# Altium footprint library Miscellaneous Devices.PcbLib: 306 footprints (part 6 of 20)
Each footprint in its own frame and in the unit in brackets; x right, y up, seen from the top. Pads: shape width x height; smd on the part's side, far side on the other; paste and mask are expansions set on the pad; w line width, h text height; cw(c..) or ccw(c..) is an arc to the next point about the centre after c.
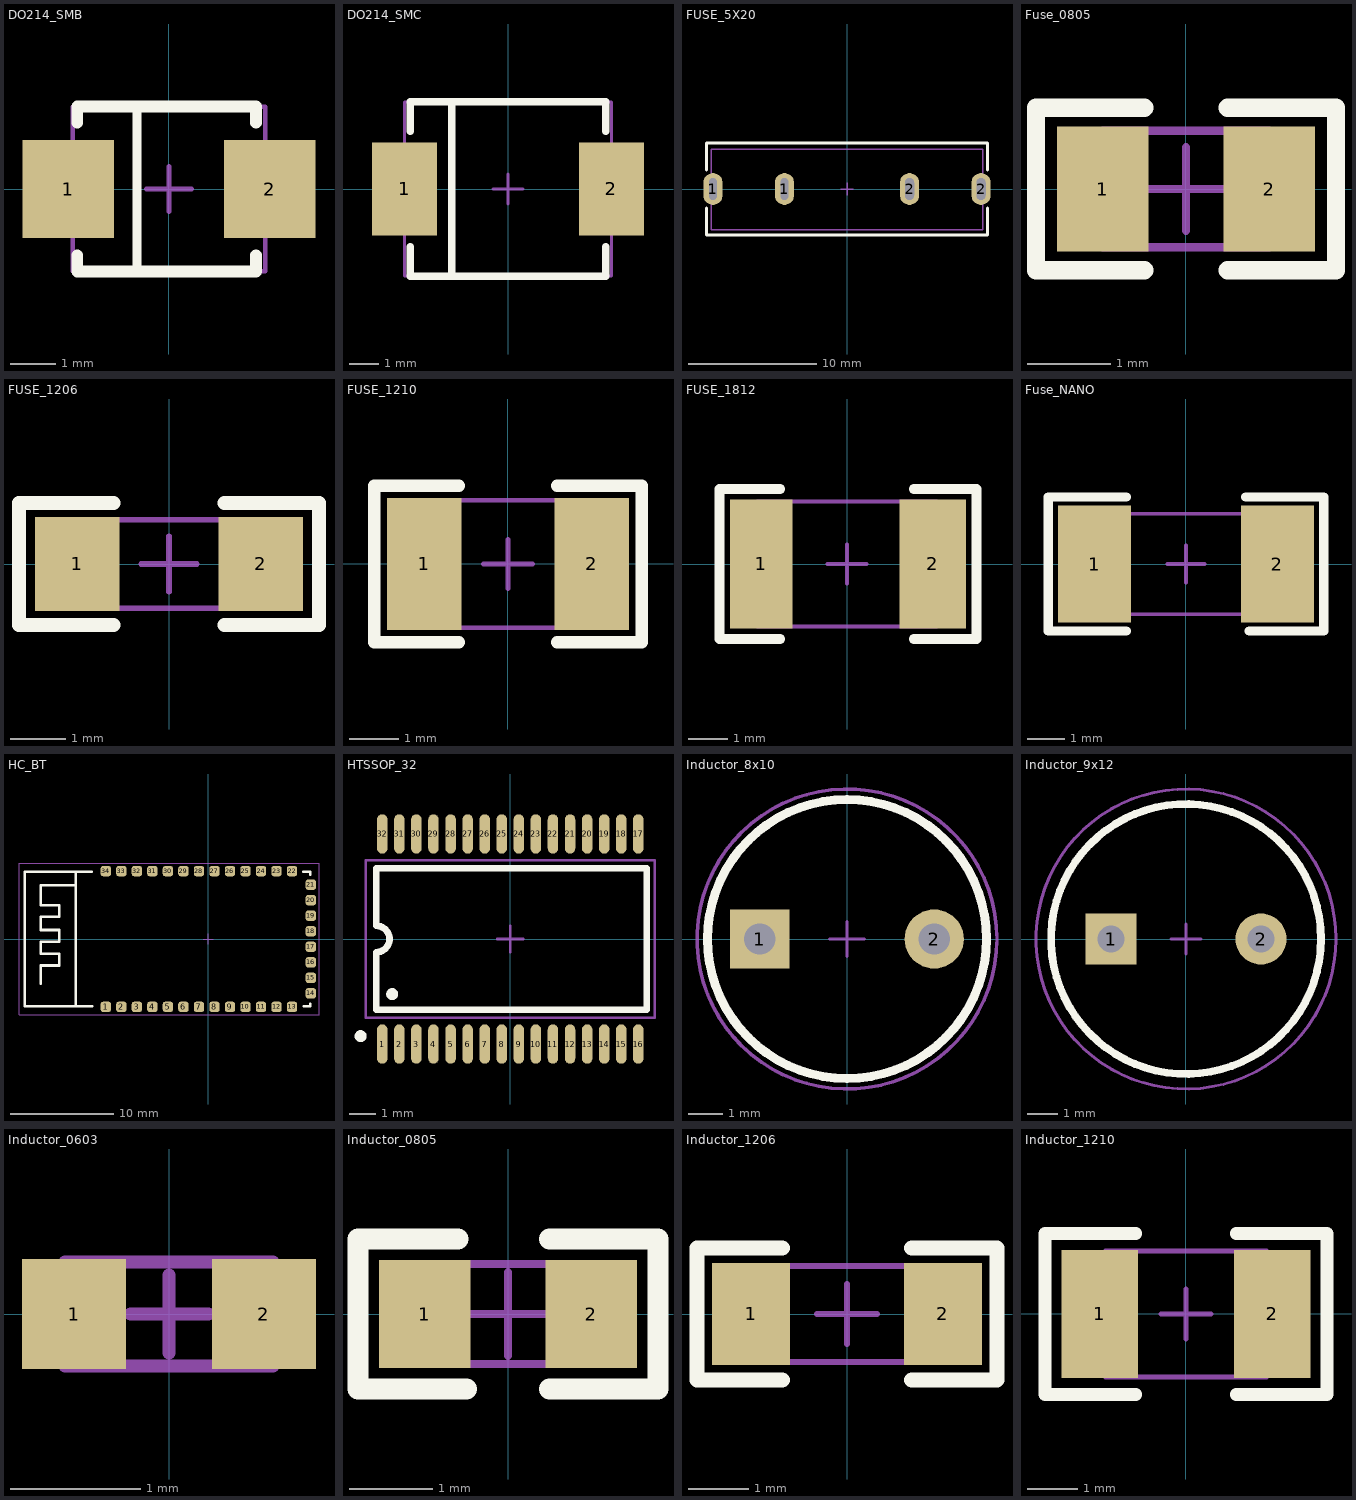
[diagram p5: the footprints below, top view; thin cyan lines are the x and y axes]

## DO214_SMB [mm]
pads (2):
  rect 2x2.15 smd: 1(-2.2,0) 2(2.2,0)
Top Overlay:
  lines w0.2: -0.7,-1.8 -0.7,1.8
  lines w0.254: -2,-1.45 -2,-1.8 1.9,-1.8 1.9,-1.45 ; -2,1.45 -2,1.8 1.9,1.8 1.9,1.45
Mechanical 15:
  lines w0.1: -0.5,0 0.5,0 ; 0,-0.5 0,0.5 ; -2.1,-1.8 -2.1,1.8 2.1,1.8 2.1,-1.8 -2.1,-1.8
3D body: height 2.3, standoff 0, extent -2.7,-1.8 2.7,1.8

## DO214_SMC [mm]
pads (2):
  rect 2.2x3.15 smd: 1(-3.5,0) 2(3.5,0)
Top Overlay:
  lines w0.254: -3.3,-1.95 -3.3,-2.95 3.3,-2.95 3.3,-1.95 ; -3.3,1.95 -3.3,2.95 3.3,2.95 3.3,1.95 ; -1.9,-2.95 -1.9,2.95
Mechanical 15:
  lines w0.1: -0.5,0 0.5,0 ; 0,-0.5 0,0.5 ; -3.5,-2.95 -3.5,2.95 3.5,2.95 3.5,-2.95 -3.5,-2.95
3D body: height 2.3, standoff 0, extent -4,-2.95 3.95,2.95

## FUSE_5X20 [mm]
pads (4):
  oval 1.5x2.5 hole 0.6 slot 1.7 at 90 deg: 1(-10.5,0) 1(-4.9,0)
  oval 1.5x2.5 hole 0.7 slot 1.7 at 90 deg: 2(4.9,0) 2(10.5,0)
Top Overlay:
  lines w0.254: -11,-1.5 -11,-3.6 11,-3.6 11,-1.5 ; -11,1.5 -11,3.6 11,3.6 11,1.5
Mechanical 15:
  lines w0.1: -0.5,0 0.5,0 ; 0,-0.5 0,0.5 ; -10.652,-3.2 -10.652,3.1 10.626,3.1 10.626,-3.2 -10.652,-3.2
3D body: height 9.59, standoff -3.31, extent -10.652,-3.135 10.626,3.055

## Fuse_0805 [mm]
pads (2):
  rect 1.1x1.5 smd: 1(-1,0) 2(1,0)
Top Overlay:
  lines w0.22: -0.5,-0.975 -1.8,-0.975 -1.8,0.975 -0.5,0.975 ; 0.5,-0.975 1.8,-0.975 1.8,0.975 0.5,0.975
Mechanical 15:
  lines w0.1: -0.5,0 0.5,0 ; 0,-0.5 0,0.5 ; -1,-0.7 1,-0.7 1,0.7 -1,0.7 -1,-0.7
3D body: height 1.24, standoff 0, extent -1.105,-0.75 1.105,0.749

## FUSE_1206 [mm]
pads (2):
  rect 1.524x1.7 smd: 1(-1.65,0) 2(1.65,0)
Top Overlay:
  lines w0.254: -1,-1.1 -2.7,-1.1 -2.7,1.1 -1,1.1 ; 1,-1.1 2.7,-1.1 2.7,1.1 1,1.1
Mechanical 15:
  lines w0.1: -0.5,0 0.5,0 ; 0,-0.5 0,0.5 ; -1.6,-0.8 1.6,-0.8 1.6,0.8 -1.6,0.8 -1.6,-0.8
3D body: height 1.43, standoff -0.03, extent -1.601,-0.852 1.601,0.8

## FUSE_1210 [mm]
pads (2):
  rect 1.52x2.7 smd: 1(-1.71,0) 2(1.71,0)
Top Overlay:
  lines w0.254: -1,-1.6 -2.725,-1.6 -2.725,1.6 -1,1.6 ; 1,-1.6 2.725,-1.6 2.725,1.6 1,1.6
Mechanical 15:
  lines w0.1: -0.5,0 0.5,0 ; 0,-0.5 0,0.5 ; -1.6,-1.3 1.6,-1.3 1.6,1.3 -1.6,1.3 -1.6,-1.3
3D body: height 0.67, standoff 0, extent -1.607,-1.275 1.608,1.3

## FUSE_1812 [mm]
pads (2):
  rect 1.6x3.3 smd: 1(-2.2,0)
  rect 1.7x3.3 smd: 2(2.2,0)
Top Overlay:
  lines w0.254: -1.714,-1.925 -3.275,-1.925 -3.275,1.925 -1.714,1.925 ; 1.714,-1.925 3.325,-1.925 3.325,1.925 1.714,1.925
Mechanical 15:
  lines w0.1: -0.5,0 0.5,0 ; 0,-0.5 0,0.5 ; -2.3,-1.6 2.3,-1.6 2.3,1.6 -2.3,1.6 -2.3,-1.6
3D body: height 1.03, standoff 0, extent -2.321,-1.748 2.414,1.732

## Fuse_NANO [mm]
pads (2):
  rect 1.96x3.15 smd: 1(-2.455,0) 2(2.455,0)
Top Overlay:
  lines w0.254: -1.6,-1.8 -3.7,-1.8 -3.7,1.8 -1.6,1.8 ; 1.6,1.8 3.7,1.8 3.7,-1.8 1.7,-1.8
Mechanical 15:
  lines w0.1: -0.5,0 0.5,0 ; 0,-0.5 0,0.5 ; -3.05,-1.35 -3.05,1.35 3.05,1.35 3.05,-1.35 -3.05,-1.35
3D body: height 2.7, standoff 0, extent -3.05,-1.35 3.05,1.35

## HC_BT [mm]
pads (34):
  rrect50% 1x1 smd: 1(-9.906,-6.562) 2(-8.406,-6.562) 3(-6.906,-6.562) 4(-5.406,-6.562) 5(-3.906,-6.562) 6(-2.406,-6.562) 7(-0.906,-6.562) 8(0.594,-6.562) 9(2.094,-6.562) 10(3.594,-6.562) 11(5.094,-6.562) 12(6.594,-6.562) 13(8.094,-6.562) 14(9.906,-5.25) 15(9.906,-3.75) 16(9.906,-2.25) 17(9.906,-0.75) 18(9.906,0.75) 19(9.906,2.25) 20(9.906,3.75) 21(9.906,5.25) 22(8.094,6.562) 23(6.594,6.562) 24(5.094,6.562) 25(3.594,6.562) 26(2.094,6.562) 27(0.594,6.562) 28(-0.906,6.562) 29(-2.406,6.562) 30(-3.906,6.562) 31(-5.406,6.562) 32(-6.906,6.562) 33(-8.406,6.562) 34(-9.906,6.562)
Top Overlay:
  lines w0.254: -16.191,-4.341 -16.191,-2.563 -14.413,-2.563 -14.413,-1.42 -16.191,-1.42 -16.191,-0.277 -14.413,-0.277 -14.413,0.866 -16.191,0.866 -16.191,2.136 -14.413,2.136 -14.413,3.279 -16.191,3.279 -16.191,5.184 -16.181,5.194 -12.899,5.194 ; -12.8,-6.5 -12.8,6.5 ; -11.284,6.5 -17.756,6.5 -17.756,-6.5 -11.238,-6.5 ; 9.163,6.5 9.844,6.5 9.844,6.2 ; 9.209,-6.5 9.844,-6.5 9.844,-6.246
Mechanical 15:
  lines w0.1: -0.5,0 0.5,0 ; 0,-0.5 0,0.5 ; -18.3,-7.3 10.7,-7.3 10.7,7.3 -18.3,7.3 -18.3,-7.3
3D body: height 2.35, standoff 0, extent -18.11,-7 9.9,7.02

## HTSSOP_32 [mm] "6   0.65"
pads (32):
  oval 0.4x1.5 smd: 1(-4.875,-4) 2(-4.225,-4) 3(-3.575,-4) 4(-2.925,-4) 5(-2.275,-4) 6(-1.625,-4) 7(-0.975,-4) 8(-0.325,-4) 9(0.325,-4) 10(0.975,-4) 11(1.625,-4) 12(2.275,-4) 13(2.925,-4) 14(3.575,-4) 15(4.225,-4) 16(4.875,-4) 17(4.875,4) 18(4.225,4) 19(3.575,4) 20(2.925,4) 21(2.275,4) 22(1.625,4) 23(0.975,4) 24(0.325,4) 25(-0.325,4) 26(-0.975,4) 27(-1.625,4) 28(-2.275,4) 29(-2.925,4) 30(-3.575,4) 31(-4.225,4) 32(-4.875,4)
Top Overlay:
  circle w0.254: c-4.5,-2.1 r0.1
  circle w0.254: c-5.7,-3.7 r0.1
  lines w0.254: -5.1,-2.7 5.2,-2.7 5.2,2.7 -5.1,2.7 -5.1,0.5 cw(c-5.1,0) -5.1,-0.5 -5.1,-2.7
Mechanical 15:
  lines w0.1: -0.5,0 0.5,0 ; 0,-0.5 0,0.5 ; -5.5,-3 -5.5,3 5.5,3 5.5,-3 -5.5,-3
3D body: height 1.08, standoff -0.02, extent -5.55,-4.1 5.55,4.117

## Inductor_8x10 [mm]
pads (2):
  rect 1.7x1.7 hole 0.9: 1(-2.5,0)
  round 1.7 hole 0.9: 2(2.5,0)
Top Overlay:
  circle w0.254: c0,0 r4
Mechanical 15:
  circle w0.1: c0,0 r4.3
  lines w0.1: -0.5,0 0.5,0 ; 0,-0.5 0,0.5
3D body: height 11.2, standoff -5, extent -4.15,-4.15 4.15,4.15

## Inductor_9x12 [mm]
pads (2):
  rect 1.7x1.7 hole 0.9: 1(-2.5,0)
  round 1.7 hole 0.9: 2(2.5,0)
Top Overlay:
  circle w0.254: c0,0 r4.5
Mechanical 15:
  circle w0.1: c0,0 r5
  lines w0.1: -0.5,0 0.5,0 ; 0,-0.5 0,0.5
3D body: height 3, standoff -1, extent 2.15,-0.349 2.847,0.349
3D body: height 3, standoff -1, extent -2.849,-0.35 -2.151,0.349
3D body: height 4, standoff 0, extent -4.5,-4.5 4.465,4.482
3D body: height 15, standoff 10, extent -4.5,-4.5 4.465,4.482
3D body: height 10, standoff 4, extent -3.984,-4 3.984,3.984

## Inductor_0603 [mm]
pads (2):
  rect 0.8x0.85 smd: 1(-0.73,0) 2(0.73,0)
Mechanical 15:
  lines w0.1: -0.297,0 0.303,0 ; 0,-0.3 0,0.3 ; -0.8,-0.4 -0.8,0.4 0.8,0.4 0.8,-0.4 -0.8,-0.4
3D body: height 0.8, standoff 0, extent -0.8,-0.47 0.8,0.48

## Inductor_0805 [mm]
pads (2):
  rect 1.1x1.3 smd: 1(-1,0) 2(1,0)
Top Overlay:
  lines w0.254: -0.6,0.9 -1.8,0.9 -1.8,-0.9 -0.5,-0.9 ; 0.5,-0.9 1.8,-0.9 1.8,0.9 0.5,0.9
Mechanical 15:
  lines w0.1: -0.5,0 0.5,0 ; 0,-0.5 0,0.5 ; -1,-0.6 1,-0.6 1,0.6 -1,0.6 -1,-0.6
3D body: height 0.95, standoff 0, extent -1,-0.6 1,0.6

## Inductor_1206 [mm]
pads (2):
  rect 1.3x1.7 smd: 1(-1.6,0) 2(1.6,0)
Top Overlay:
  lines w0.254: -1.079,-1.1 -2.5,-1.1 -2.5,1.1 -1.079,1.1 ; 1.079,-1.1 2.5,-1.1 2.5,1.1 1.079,1.1
Mechanical 15:
  lines w0.1: -0.5,0 0.5,0 ; 0,-0.5 0,0.5 ; -1.6,-0.8 1.6,-0.8 1.6,0.8 -1.6,0.8 -1.6,-0.8
3D body: height 1.1, standoff 0, extent -1.6,-0.8 1.6,0.8

## Inductor_1210 [mm]
pads (2):
  rect 1.52x2.54 smd: 1(-1.71,0) 2(1.71,0)
Top Overlay:
  lines w0.254: -1,-1.6 -2.8,-1.6 -2.8,1.6 -1,1.6 ; 1,-1.6 2.8,-1.6 2.8,1.6 1,1.6
Mechanical 15:
  lines w0.1: -0.5,0 0.5,0 ; 0,-0.5 0,0.5 ; -1.6,-1.25 -1.6,1.25 1.6,1.25 1.6,-1.25 -1.6,-1.25
3D body: height 1.35, standoff 0, extent -1.6,-1.25 1.6,1.25